# Altium footprint library FTP.PcbLib: 207 footprints (part 9 of 13)
Each footprint in its own frame and in the unit in brackets; x right, y up, seen from the top. Pads: shape width x height; smd on the part's side, far side on the other; paste and mask are expansions set on the pad; w line width, h text height; cw(c..) or ccw(c..) is an arc to the next point about the centre after c.
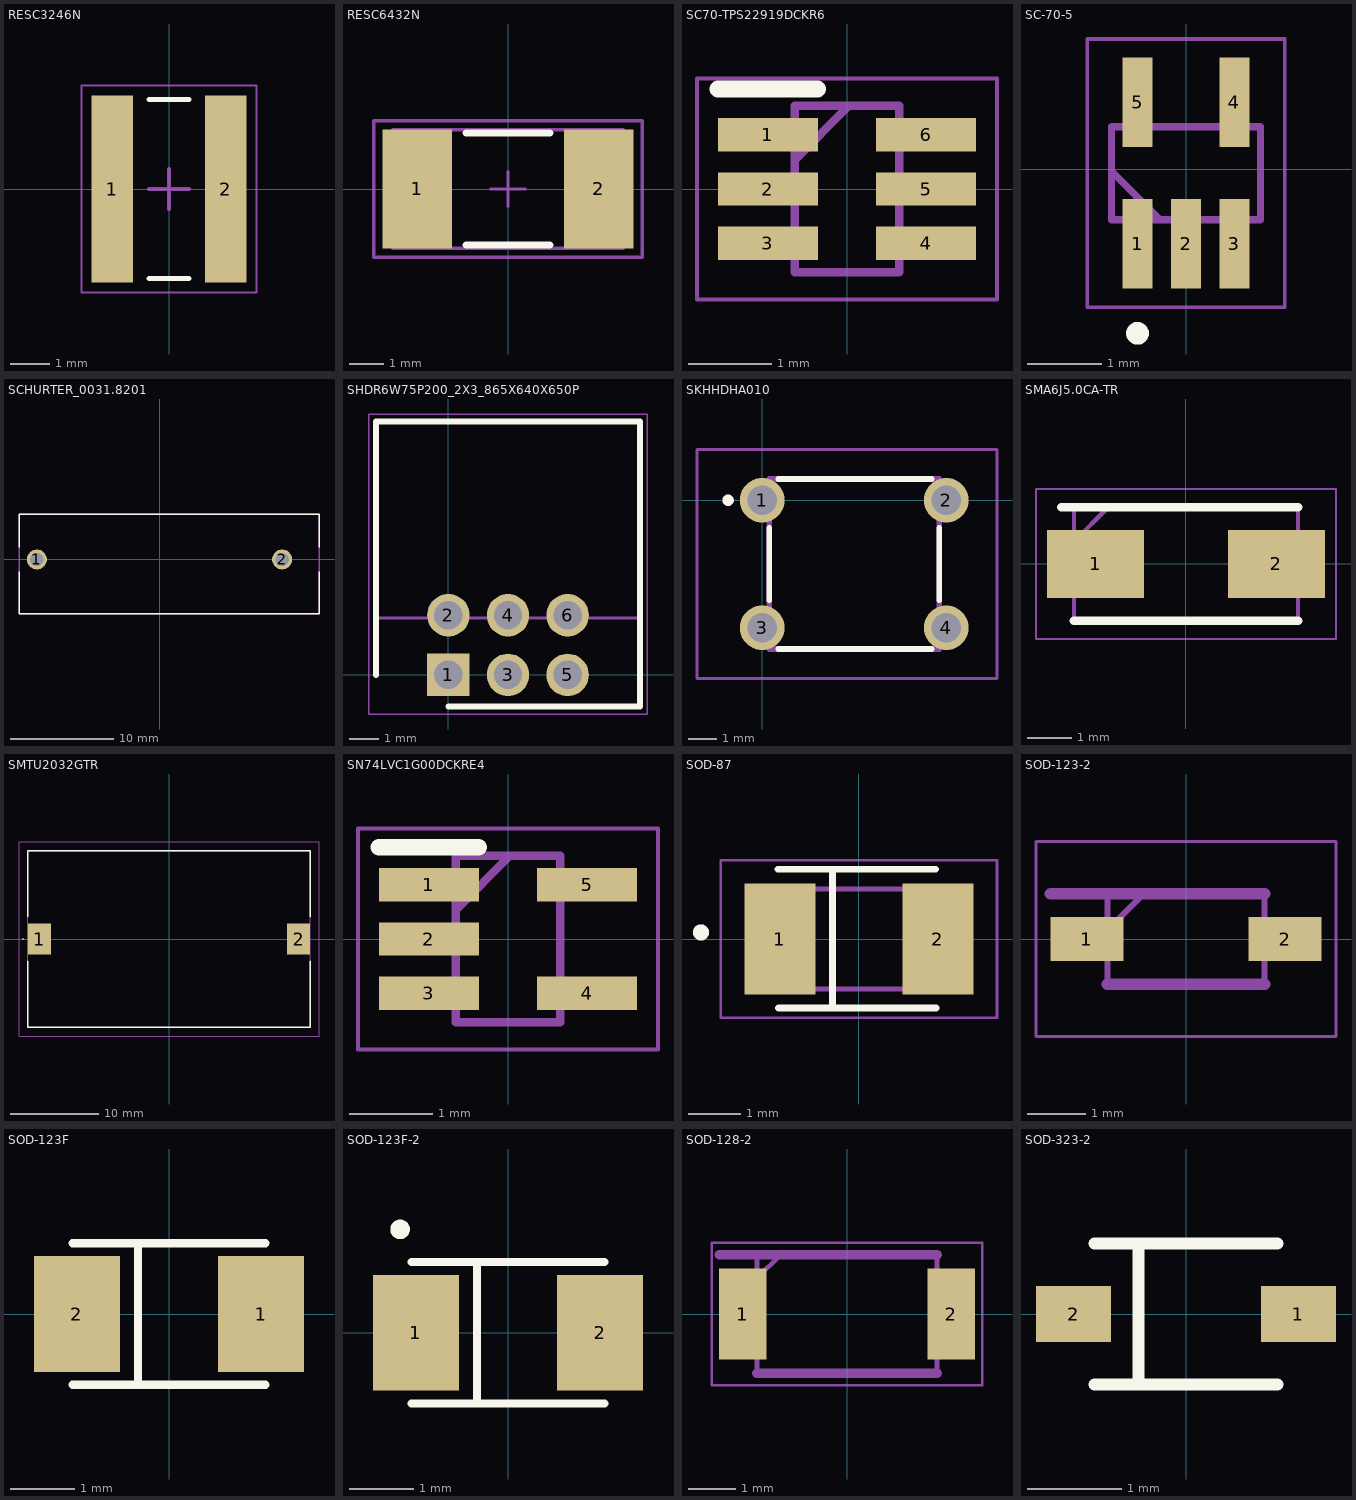
[diagram p8: the footprints below, top view; thin cyan lines are the x and y axes]

## RESC3246N [mm] "Chip Resistor, 2-Leads, Body 3,10x4,60mm, IPC Medium Density"
height 0.65
pads (2):
  rect 1.05x4.7 smd: 1(-1.425,0) 2(1.425,0)
Top Overlay:
  lines w0.127: -0.5,-2.25 0.5,-2.25 ; -0.5,2.25 0.5,2.25
Mechanical 15:
  lines w0.05: -2.2,-2.6 2.2,-2.6 2.2,2.6 -2.2,2.6 -2.2,-2.6
  lines w0.1: -0.5,0 0.5,0 ; 0,-0.5 0,0.5
3D body "User Library-wk732j.step": height 0.61, standoff 0, extent -1.576,-2.3 1.524,2.3

## RESC6432N [mm] "Chip Resistor, Body 6.4x3.2mm, IPC Medium Density"
height 1.2
pads (2):
  rect 2x3.4 smd: 1(-2.6,0) 2(2.6,0)
Top Overlay:
  lines w0.2: -1.2,-1.6 1.2,-1.6 ; -1.2,1.6 1.2,1.6
Mechanical 13:
  lines w0.1: -3.3,-1.7 3.3,-1.7 3.3,1.7 -3.3,1.7 -3.3,-1.7
Mechanical 15:
  lines w0.1: -0.5,0 0.5,0 ; 0,-0.5 0,0.5 ; -3.85,-1.95 3.85,-1.95 3.85,1.95 -3.85,1.95 -3.85,-1.95
3D body: height 1.2, standoff 0, extent -3.3,-1.7 3.3,1.7

## SC70-TPS22919DCKR6 [mm]
pads (6):
  rect 1.2x0.4 smd: 1(-0.95,0.65) 2(-0.95,0) 3(-0.95,-0.65) 4(0.95,-0.65) 5(0.95,0) 6(0.95,0.65)
Top Overlay:
  lines w0.2: -1.55,1.2 -0.35,1.2
Mechanical 15:
  lines w0.1: -0.625,0.35 0.025,1 ; -0.625,-1 0.625,-1 0.625,1 -0.625,1 -0.625,-1
Mechanical 20:
  lines w0.05: -1.8,-1.325 1.8,-1.325 1.8,1.325 -1.8,1.325 -1.8,-1.325
3D body "TPS22919DCKR.stp": height 1.1, standoff 0, extent -1.025,-1 1.075,1

## SC-70-5 [mm]
pads (5):
  rect 0.4x1.2 smd mask+0.05: 1(-0.65,-1) 2(0,-1) 3(0.65,-1)
  rect 0.4x1.2 smd: 4(0.65,0.9) 5(-0.65,0.9)
Top Overlay:
  circle w0.152: c-0.65,-2.2 r0.076
Mechanical 13:
  lines w0.1: -1,-0.025 -0.35,-0.675 ; -1,-0.675 1,-0.675 1,0.575 -1,0.575 -1,-0.675
Mechanical 15:
  lines w0.05: -1.325,-1.85 1.325,-1.85 1.325,1.75 -1.325,1.75 -1.325,-1.85
3D body "LMV321AIDCKR.stp": height 1.1, standoff 0, extent -1,-1.1 1,1

## SCHURTER_0031.8201 [mm]
pads (2):
  round 1.95 hole 1.3: 1(-11.875,0) 2(11.875,0)
Top Overlay:
  lines w0.127: -13.611,1.2 -13.611,4.375 15.45,4.375 15.45,1.2 ; -13.6,-1.2 -13.6,-5.25 15.45,-5.25 15.45,-1.2
Mechanical 13:
  lines w0.127: -13.611,-5.25 -13.611,4.375 15.45,4.375 15.45,-5.25 -13.611,-5.25
Mechanical 15:
  lines w0.127: -13.611,-5.25 -13.611,4.375 15.45,4.375 15.45,-5.25 -13.611,-5.25
3D body "User Library-20mm_fuse.STEP": height 15.5, standoff 10.5, extent -8.603,-2.794 11.397,2.206
3D body "31-8001.stp": height 17, standoff -3, extent -13.611,-5.182 15.389,4.318

## SHDR6W75P200_2X3_865X640X650P [mm]
pads (6):
  rect 1.425x1.425 / inner round 1.425 / far side rect 1.425x1.425 hole 0.95: 1(0,0)
  round 1.425 hole 0.95: 2(0,2) 3(2,0) 4(2,2) 5(4,0) 6(4,2)
Top Overlay:
  lines w0.2: -2.425,0 -2.425,8.5 6.425,8.5 6.425,-1.062 0,-1.062
Mechanical 15:
  lines w0.1: -2.425,1.9 -2.425,8.5 6.425,8.5 6.425,1.9 -2.425,1.9
Mechanical 20:
  lines w0.05: -2.675,-1.312 -2.675,8.75 6.675,8.75 6.675,-1.312 -2.675,-1.312
3D body "User Library-PCB Header Molex Typ 87833-xx20 (Right Angle).STEP": height 6.45, standoff -2.01, extent -2.425,-0.394 6.235,8.256

## SKHHDHA010 [mm]
pads (4):
  round 1.58 hole 1.05: 1(0,0) 2(6.5,0) 3(0,-4.5) 4(6.5,-4.5)
Top Overlay:
  lines w0.2: 0.25,-3.527 0.25,-0.978 ; 0.573,-5.25 5.982,-5.25 ; 0.573,0.75 5.982,0.75 ; 6.25,-3.527 6.25,-0.978 ; -1.2,-0.1 cw(c-1.2,0) -1.2,0.1 cw(c-1.2,0) -1.2,-0.1
Mechanical 15:
  lines w0.2: 0.25,-5.25 0.25,0.75 6.25,0.75 6.25,-5.25 0.25,-5.25
Mechanical 20:
  lines w0.1: -2.3,-6.29 -2.3,1.79 8.29,1.79 8.29,-6.29 -2.3,-6.29
3D body "SKHHDHA010.stp": height 17, standoff -3.5, extent -0.648,-5.334 7.252,0.866

## SMA6J5.0CA-TR [mm]
pads (2):
  rect 2.2x1.55 smd: 1(-2.05,0) 2(2.05,0)
Top Overlay:
  lines w0.2: -2.825,1.288 2.538,1.288 ; -2.538,-1.288 2.538,-1.288
Mechanical 15:
  lines w0.1: -2.538,0.512 -1.762,1.288 ; -2.538,-1.288 2.538,-1.288 2.538,1.288 -2.538,1.288 -2.538,-1.288
Mechanical 20:
  lines w0.05: -3.4,-1.7 3.4,-1.7 3.4,1.7 -3.4,1.7 -3.4,-1.7
3D body "SMA6J5.0CA-TR.stp": height 2.23, standoff 0, extent -2.41,-1.237 2.665,1.338

## SMTU2032GTR [mm]
pads (2):
  rect 2.6x3.5 smd: 1(-14.7,0) 2(14.7,0)
Top Overlay:
  lines w0.1: -16.6,0 cw(c-16.55,0) -16.5,0 cw(c-16.55,0) -16.6,0
  lines w0.2: -16,-2.54 -16,-10 16,-10 16,-2.54 ; -16,2.54 -16,10 16,10 16,2.54
Mechanical 15:
  lines w0.1: -16,-10 -16,10 16,10 16,-10 -16,-10
Mechanical 20:
  lines w0.1: -17,-11 -17,11 17,11 17,-11 -17,-11
3D body "SMTU2032-G.TR.stp": height 5.55, standoff 0, extent -15.9,-8.05 16.1,8.05
3D body "CR2032.stp": height 5, standoff 1.5, extent -10.2,-10.4 9.8,9.6

## SN74LVC1G00DCKRE4 [mm]
pads (5):
  rect 1.2x0.4 smd: 1(-0.95,0.65) 2(-0.95,0) 3(-0.95,-0.65) 4(0.95,-0.65) 5(0.95,0.65)
Top Overlay:
  lines w0.2: -1.55,1.1 -0.35,1.1
Mechanical 15:
  lines w0.1: -0.625,0.35 0.025,1 ; -0.625,-1 0.625,-1 0.625,1 -0.625,1 -0.625,-1
Mechanical 20:
  lines w0.05: -1.8,-1.325 1.8,-1.325 1.8,1.325 -1.8,1.325 -1.8,-1.325

## SOD-87 [mm]
pads (2):
  rect 1.35x2.1 smd: 1(-1.5,0) 2(1.5,0)
Top Overlay:
  circle w0.152: c-3,0.125 r0.076
  lines w0.127: -1.544,1.325 1.456,1.325 ; -1.529,-1.31 1.471,-1.31 ; -0.5,-1.31 -0.5,1.325
Mechanical 13:
  lines w0.1: -1.7,0.275 -1.025,0.95 ; -1.7,-0.95 -1.7,0.95 1.7,0.95 1.7,-0.95 -1.7,-0.95
Mechanical 15:
  lines w0.05: -2.625,-1.5 -2.625,1.5 2.625,1.5 2.625,-1.5 -2.625,-1.5
3D body "cd1408-r1200.STEP": height 1.05, standoff -0.1, extent -1.7,-0.95 1.7,0.95

## SOD-123-2 [mm]
pads (2):
  rect 1.25x0.75 smd: 1(-1.7,0) 2(1.7,0)
3D Body Bottom:
  lines w0.2: -2.325,0.775 1.35,0.775 ; -1.35,-0.775 1.35,-0.775
Bottom Assembly:
  lines w0.05: -2.575,-1.675 -2.575,1.675 2.575,1.675 2.575,-1.675 -2.575,-1.675
  lines w0.1: -1.35,0.15 -0.725,0.775 ; -1.35,-0.775 -1.35,0.775 1.35,0.775 1.35,-0.775 -1.35,-0.775
3D body "SOD-123.step": height 1.36, standoff 0, extent -1.925,-0.85 1.925,0.85

## SOD-123F [mm]
pads (2):
  rect 1.34x1.8 smd paste-0.025 mask+0.07: 1(1.43,0) 2(-1.43,0)
Top Overlay:
  lines w0.127: -1.5,-1.1 1.5,-1.1 ; -1.5,1.1 1.5,1.1 ; -0.483,-1.092 -0.483,1.1
3D body "SOD123.STEP": height 1.27, standoff 0, extent -1.85,-0.8 1.85,0.8

## SOD-123F-2 [mm]
pads (2):
  rect 1.34x1.8 smd paste-0.025 mask+0.07: 1(-1.43,0) 2(1.43,0)
Top Overlay:
  circle w0.152: c-1.677,1.605 r0.076
  lines w0.127: -1.5,-1.1 1.5,-1.1 ; -1.5,1.1 1.5,1.1 ; -0.483,-1.092 -0.483,1.1
3D body "SOD123.STEP": height 1.27, standoff 0, extent -1.85,-0.8 1.85,0.8

## SOD-128-2 [mm]
pads (2):
  rect 1x1.93 smd: 1(-2.2,0) 2(2.2,0)
3D Body Bottom:
  lines w0.2: -2.7,1.25 1.9,1.25 ; -1.9,-1.25 1.9,-1.25
Bottom Assembly:
  lines w0.05: -2.85,-1.5 -2.85,1.5 2.85,1.5 2.85,-1.5 -2.85,-1.5
  lines w0.1: -1.9,0.75 -1.4,1.25 ; -1.9,-1.25 -1.9,1.25 1.9,1.25 1.9,-1.25 -1.9,-1.25
3D body "SOD-128 (CFP5) marking pin 1.stp": height 1.1, standoff 0, extent -2.627,-1.354 2.373,1.346

## SOD-323-2 [mm]
pads (2):
  rect 0.8x0.6 smd paste-0.025 mask+0.07: 1(1.2,0) 2(-1.2,0)
Top Overlay:
  lines w0.127: -0.975,-0.75 0.975,-0.75 ; -0.975,0.75 0.975,0.75 ; -0.508,-0.711 -0.508,0.737
3D body "SOD323-1.step": height 1.1, standoff 0, extent -1.3,-0.675 1.3,0.675